# Altium footprint library Connectors.PcbLib: 60 footprints (part 4 of 4)
Each footprint in its own frame and in the unit in brackets; x right, y up, seen from the top. Pads: shape width x height; smd on the part's side, far side on the other; paste and mask are expansions set on the pad; w line width, h text height; cw(c..) or ccw(c..) is an arc to the next point about the centre after c.
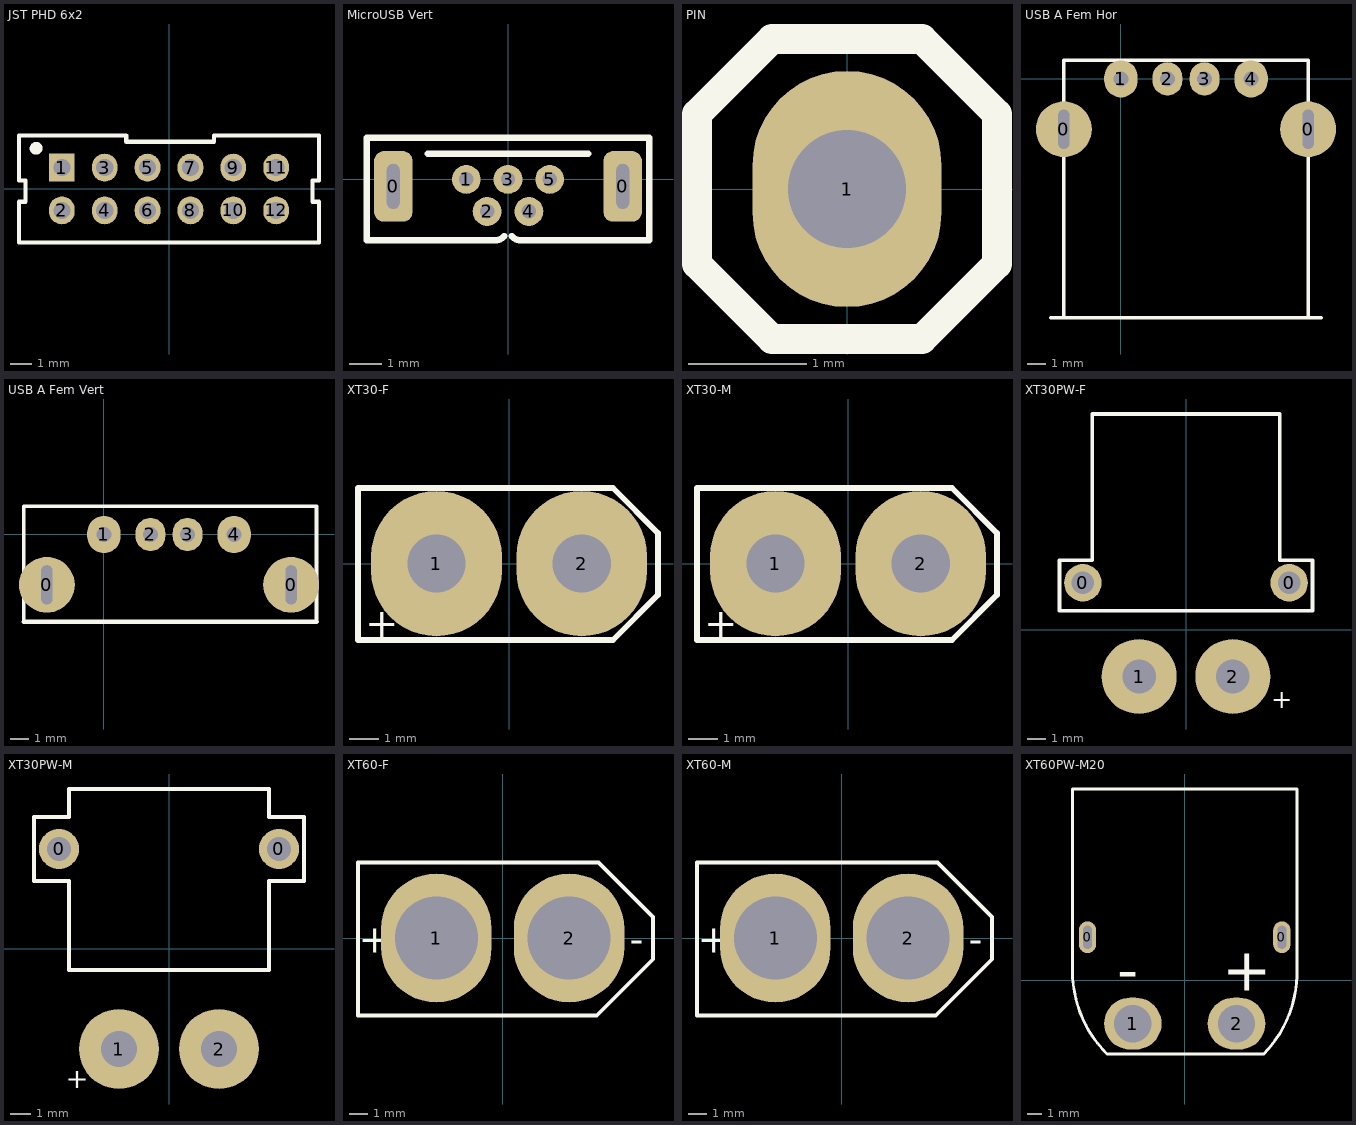
[diagram p3: the footprints below, top view; thin cyan lines are the x and y axes]

## JST PHD 6x2 [mm] "Pitch 2.0mm"
height 6
pads (12):
  rect 1.2x1.3 hole 0.8: 1(-5,1)
  oval 1.2x1.3 hole 0.8: 2(-5,-1) 3(-3,1) 4(-3,-1) 5(-1,1) 6(-1,-1) 7(1,1) 8(1,-1) 9(3,1) 10(3,-1) 11(5,1) 12(5,-1)
Top Overlay:
  circle w0.4: c-6.2,1.9 r0.1
  lines w0.2: -7,-2.5 -7,-0.6 -6.7,-0.6 -6.7,0.4 -7,0.4 -7,2.5 -2,2.5 -2,2.2 2.1,2.2 2.1,2.5 7,2.5 7,0.4 6.7,0.4 6.7,-0.6 7,-0.6 7,-2.5 -7,-2.5
3D body: height 6.5, standoff -2, extent -6.95,-2.5 6.95,2.5

## MicroUSB Vert [mm] "Micro USB Jack - Typ B, THT, vertical"
height 6
pads (7):
  rrect50% 1.2x2.2 hole 0.4 slot 1.4 at 90 deg: 0(-3.575,-0.22) 0(3.575,-0.22)
  round 0.9 hole 0.45: 1(-1.3,0) 2(-0.65,-1) 3(0,0) 4(0.65,-1) 5(1.3,0)
Top Overlay:
  lines w0.2: -2.5,0.8 2.5,0.8 ; -0.112,-1.766 cw(c-0.4,-1.524) -0.4,-1.9 -4.4,-1.9 -4.4,1.3 4.4,1.3 4.4,-1.9 0.4,-1.9 cw(c0.4,-1.524) 0.112,-1.766
3D body: height 6.64, standoff -1.27, extent -4,-1.81 4,1.205

## PIN [mm]
pads (1):
  oval 1.6x2 hole 1: 1(0,0)
Top Overlay:
  lines w0.254: -1.27,-0.635 -0.635,-1.27 0.635,-1.27 1.27,-0.635 1.27,0.635 0.635,1.27 -0.635,1.27 -1.27,0.635 -1.27,-0.635
3D body: height 8.14, standoff -2.66, extent -1.27,-1.27 1.27,1.27

## USB A Fem Hor [mm] "USB Type A Female Horizontal TH"
height 6
pads (6):
  round 3 hole 0.6 slot 2.1 at 90 deg: 0(-3.07,-2.71) 0(10.07,-2.71)
  oval 1.8x2 hole 0.8: 1(0,0) 4(7,0)
  oval 1.6x1.8 hole 0.8: 2(2.5,0) 3(4.5,0)
Top Overlay:
  lines w0.2: -3.77,-12.85 -3.07,-12.85 ; 10.77,-12.85 10.07,-12.85 ; -3.07,-12.85 -3.07,1 10.07,1 10.07,-12.85 ; -3.07,-12.85 10.07,-12.85
3D body: height 7.74, standoff -2.74, extent -3.75,-13.038 10.75,1.462

## USB A Fem Vert [mm] "USB Type A Female Vertical TH"
height 6
pads (6):
  round 3 hole 0.6 slot 2.1 at 90 deg: 0(-3.07,-2.71) 0(10.07,-2.71)
  oval 1.8x2 hole 0.8: 1(0,0) 4(7,0)
  oval 1.6x1.8 hole 0.8: 2(2.5,0) 3(4.5,0)
Top Overlay:
  lines w0.2: -4.318,-4.699 -4.318,1.524 11.43,1.524 11.43,-4.699
  lines w0.254: -4.318,-4.699 11.43,-4.699
3D body: height 15.3, standoff -3.5, extent -4.345,-4.749 11.354,2.091

## XT30-F [mm]
height 12.6
pads (2):
  oval 4.5x5 hole 2: 1(-2.5,0) 2(2.5,0)
Top Overlay:
  lines w0.2: -5.2,-2.625 -5.2,2.6 3.575,2.6 5.125,1.05 5.125,-1.075 3.575,-2.625 -5.2,-2.625
  text "+" at -4.95,-2.525 h1
3D body: height 12.61, standoff -2.99, extent -5.3,-2.65 5.15,2.6

## XT30-M [mm]
height 12.6
pads (2):
  oval 4.5x5 hole 2: 1(-2.5,0) 2(2.5,0)
Top Overlay:
  lines w0.2: -5.2,-2.625 3.575,-2.625 5.125,-1.075 5.125,1.05 3.575,2.6 -5.2,2.6 -5.2,-2.625
  text "+" at -4.95,-2.525 h1
3D body: height 12.51, standoff -2.99, extent -5.2,-2.675 5.25,2.575

## XT30PW-F [mm]
height 5
pads (4):
  round 2 hole 1.2: 0(-5.5,2.5) 0(5.5,2.5)
  round 4 hole 1.8: 1(-2.5,-2.5) 2(2.5,-2.5)
Top Overlay:
  lines w0.2: -6.75,1 -5,1 5,1 6.75,1 6.75,3.7 5,3.7 5,11.5 -5,11.5 -5,3.7 -6.75,3.7 -6.75,1
  text "+" at 4.55,-4.2 h1
3D body: height 5.01, standoff -1.99, extent -6.65,-3.5 6.65,11.4

## XT30PW-M [mm]
height 5
pads (4):
  round 2 hole 1.2: 0(-5.5,5) 0(5.5,5)
  round 4 hole 1.8: 1(-2.5,-5) 2(2.5,-5)
Top Overlay:
  lines w0.2: -6.75,3.4 -6.75,6.6 -5,6.6 -5,8 5,8 5,6.6 6.75,6.6 6.75,3.4 5,3.4 5,-1.05 -5,-1.05 -5,3.4 -6.75,3.4
  text "+" at -5.15,-6.95 h1
3D body: height 5.01, standoff -1.99, extent -6.65,-6 6.65,7.95

## XT60-F [mm]
height 15.8
pads (2):
  oval 6x7 hole 4.5: 1(-3.6,0) 2(3.6,0)
Top Overlay:
  lines w0.2: -7.85,-4.2 -7.85,4.1 5.2,4.1 8.15,1.15 8.15,-1.15 5.1,-4.2 -7.85,-4.2
  text "+" at -7.8,-0.8 h1.52
  text "-" at 6.9,-0.8 h1.52
3D body: height 17.3, standoff -4.9, extent -7.9,-4.075 8,4.075

## XT60-M [mm]
height 16.1
pads (2):
  oval 6x7 hole 4.5: 1(-3.6,0) 2(3.6,0)
Top Overlay:
  lines w0.2: -7.85,-4.2 5.1,-4.2 8.15,-1.15 8.15,1.15 5.2,4.1 -7.85,4.1 -7.85,-4.2
  text "-" at 6.9,-0.8 h1.52
  text "+" at -7.8,-0.8 h1.52
3D body: height 16.3, standoff -4.9, extent -7.8,-4.075 8.1,4.075

## XT60PW-M20 [mm]
height 8.4
pads (4):
  oval 1.2x2.2 hole 0.6 slot 1.6 at 90 deg: 0(-6.75,3) 0(6.75,3)
  oval 4x3.6 hole 2.6: 1(-3.6,-3) 2(3.6,-3)
Top Overlay:
  lines w0.2: 5.496,-5.1 -5.4,-5.1 cw(c0.394,0.694) -7.8,0.694 -7.8,13.3 7.8,13.3 7.8,0.563 ; 5.496,-5.096 ccw(c-0.303,0.563) 7.798,0.761
  text "+" at 2.6,-0.7 h3
  text "-" at -4.7,-0.7 h3
3D body: height 8.45, standoff -2.05, extent -7.95,-5 7.95,13.3